# EAGLE library part OPA4227 (library OPA4227UA_2K5)
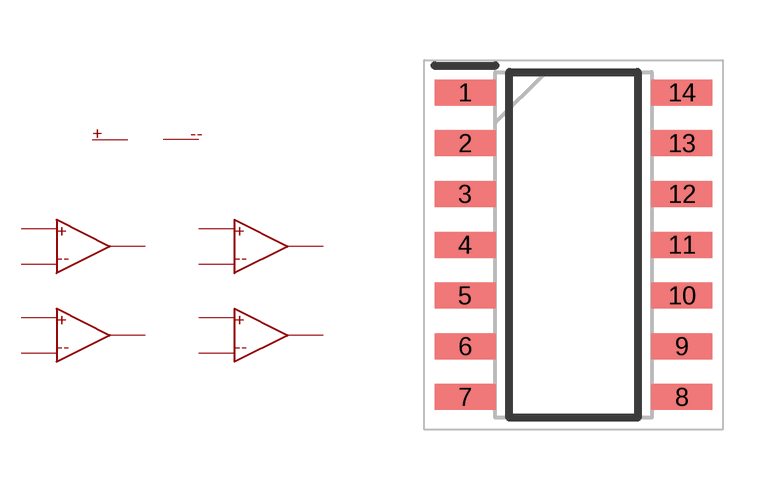
[diagram p1: symbol with the pads of SOIC127P600X175-14N; footprint SOIC127P600X175-14N]

Designator prefix -; gates G$1=OPA4277 G$2=OPA4277 G$3=OPA4277 G$4=OPA4277 G$5=PWR

## OPA4227  [SOIC127P600X175-14N]
1  G$1:AO
2  G$1:A-
3  G$1:A+
4  G$5:V+
5  G$2:A+
6  G$2:A-
7  G$2:AO
8  G$3:AO
9  G$3:A-
10  G$3:A+
11  G$5:V-
12  G$4:A+
13  G$4:A-
14  G$4:AO

## Footprint SOIC127P600X175-14N (pad centres in mm)
D (R-PDSO-G14)
smd 1.525 x 0.65: 1 -2.712,3.81; 2 -2.712,2.54; 3 -2.712,1.27; 4 -2.712,0; 5 -2.712,-1.27; 6 -2.712,-2.54; 7 -2.712,-3.81; 8 2.712,-3.81; 9 2.712,-2.54; 10 2.712,-1.27; 11 2.712,0; 12 2.712,1.27; 13 2.712,2.54; 14 2.712,3.81